# Altium integrated library LIB0.IntLib: 28 symbols
Pins are listed as number, name and electrical type; pins without a type are passive.

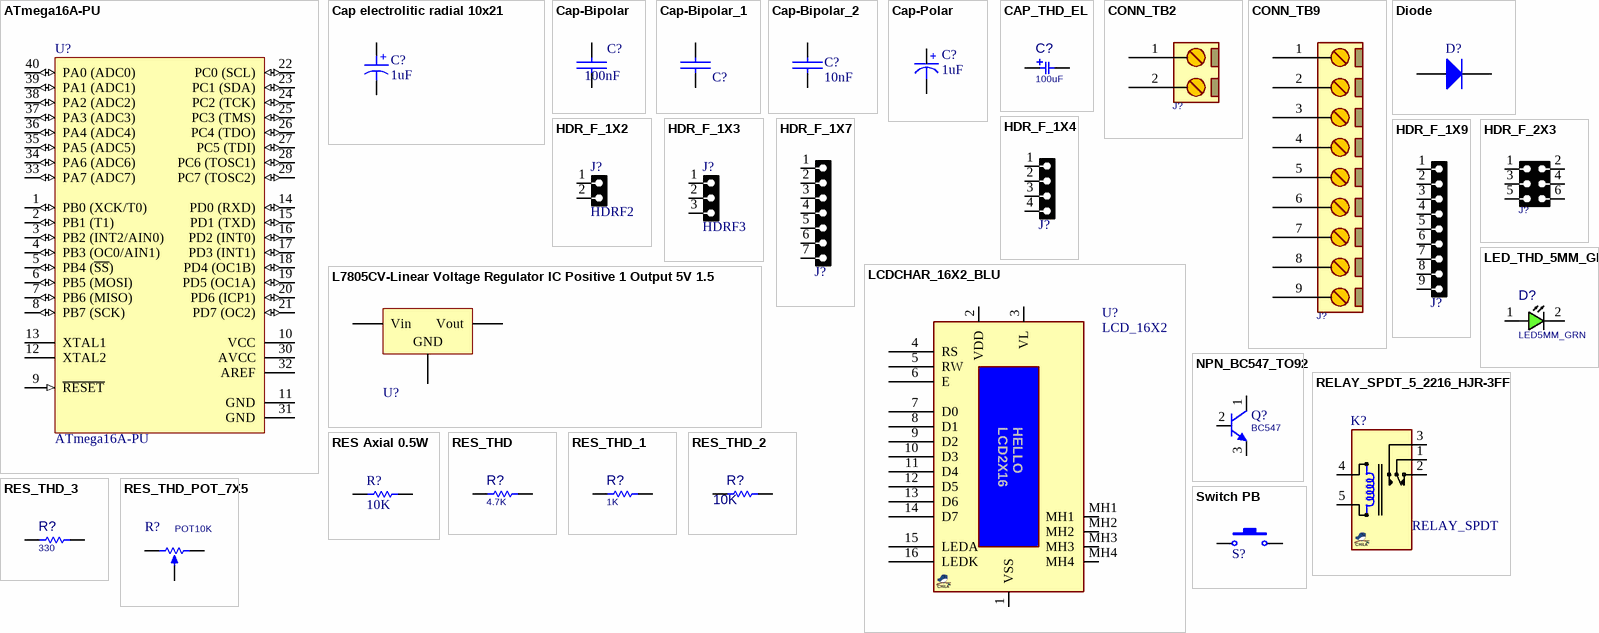
[diagram p0: symbols ATmega16A-PU to Switch PB]

## ATmega16A-PU
designator U?
footprint ATmega16A-PU 40P6
pins: 1 PB0 (XCK/T0) (io), 2 PB1 (T1) (io), 3 PB2 (INT2/AIN0) (io), 4 PB3 (OC0/AIN1) (io), 5 PB4 (~{SS}) (io), 6 PB5 (MOSI) (io), 7 PB6 (MISO) (io), 8 PB7 (SCK) (io), 9 ~{RESET} (in), 10 VCC (power), 11 GND (power), 12 XTAL2, 13 XTAL1, 14 PD0 (RXD) (io), 15 PD1 (TXD) (io), 16 PD2 (INT0) (io), 17 PD3 (INT1) (io), 18 PD4 (OC1B) (io), 19 PD5 (OC1A) (io), 20 PD6 (ICP1) (io), 21 PD7 (OC2) (io), 22 PC0 (SCL) (io), 23 PC1 (SDA) (io), 24 PC2 (TCK) (io), 25 PC3 (TMS) (io), 26 PC4 (TDO) (io), 27 PC5 (TDI) (io), 28 PC6 (TOSC1) (io), 29 PC7 (TOSC2) (io), 30 AVCC (power), 31 GND (power), 32 AREF (power), 33 PA7 (ADC7) (io), 34 PA6 (ADC6) (io), 35 PA5 (ADC5) (io), 36 PA4 (ADC4) (io), 37 PA3 (ADC3) (io), 38 PA2 (ADC2) (io), 39 PA1 (ADC1) (io), 40 PA0 (ADC0) (io)

## Cap electrolitic radial 10x21
designator C?, comment 1uF
Cap electrolitic radial; Part. No: 100U/50V; Designer: Abbas Basereh; Data: 16-12-2016
footprint Cap electrolitic radial 10x20-5 (Cap electrolitic radial 10x20-5-Design:Abbas Basereh)
pins: 1, 2
1 alternate drawing of the same symbol
text: +

## Cap-Bipolar
designator C?, comment 100nF
Bipolar Capacitor; Voltage: 100V; Designer: Saeid Jorablo; Organazation: ControTec; Adding Date: 1387/12/20; Value: 100nF
footprint Cap - 1uF - 400V - Right
footprint Cap - 1uF - 400V - Stand
footprint Cap - 10nF
footprint Cap - 100nF
footprint Cap - 100nF - MKŽ
footprint Cap - 680nF
footprint Cap - 10nF - 630V
footprint Cap - 100nF - 400V
footprint Cap - 220n - 400V - Poly
footprint Cap - 330nF - 400V
footprint Cap 402 (1005X05L) (Chip Capacitor, 2-Leads, Body 1.0x0.5mm, IPC High Density)
footprint Cap 603
footprint Cap 1206
footprint Cap 1206 (3216X15L) (Chip Capacitor, 2-Leads, Body 3.2x1.6mm, IPC High Density)
footprint Cap 1206 (3216X18L) Size A (Chip Capacitor, 2-Leads, Body 3.2x1.6mm, IPC High Density, chip Tantalum)
footprint Cap 805
pins: 1 +, 2 -

## Cap-Bipolar_1
designator C?, comment 100nF  (value not drawn)
Bipolar Capacitor; Voltage: 100V; Designer: Saeid Jorablo; Organazation: ControTec; Adding Date: 1387/12/20; Value: 100nF
footprint Cap - 1uF - 400V - Right
footprint Cap - 1uF - 400V - Stand
footprint Cap - 10nF
footprint Cap - 100nF
footprint Cap - 100nF - MKŽ
footprint Cap - 680nF
footprint Cap - 10nF - 630V
footprint Cap - 100nF - 400V
footprint Cap - 220n - 400V - Poly
footprint Cap - 330nF - 400V
footprint Cap 402 (1005X05L) (Chip Capacitor, 2-Leads, Body 1.0x0.5mm, IPC High Density)
footprint Cap 603
footprint Cap 1206
footprint Cap 1206 (3216X15L) (Chip Capacitor, 2-Leads, Body 3.2x1.6mm, IPC High Density)
footprint Cap 1206 (3216X18L) Size A (Chip Capacitor, 2-Leads, Body 3.2x1.6mm, IPC High Density, chip Tantalum)
footprint Cap 805
pins: 1 +, 2 -

## Cap-Bipolar_2
designator C?, comment 10nF
Bipolar Capacitor; Voltage: 100V; Designer: Saeid Jorablo; Organazation: ControTec; Value: 100nF; Adding Date: 1387/12/20
footprint Cap - 1uF - 400V - Right
footprint Cap - 1uF - 400V - Stand
footprint Cap - 10nF
footprint Cap - 100nF
footprint Cap - 100nF - MKŽ
footprint Cap - 680nF
footprint Cap - 10nF - 630V
footprint Cap - 100nF - 400V
footprint Cap - 220n - 400V - Poly
footprint Cap - 330nF - 400V
footprint Cap 402 (1005X05L) (Chip Capacitor, 2-Leads, Body 1.0x0.5mm, IPC High Density)
footprint Cap 603
footprint Cap 1206
footprint Cap 1206 (3216X15L) (Chip Capacitor, 2-Leads, Body 3.2x1.6mm, IPC High Density)
footprint Cap 1206 (3216X18L) Size A (Chip Capacitor, 2-Leads, Body 3.2x1.6mm, IPC High Density, chip Tantalum)
footprint Cap 805
pins: 1 +, 2 -

## Cap-Polar
designator C?, comment 1uF
Polar Capacitor; Designer: Saeid Jorablo; Organazation: ControTec; Voltage: 16V; Adding Date: 1387/12/20; Value: 1uF
footprint Cap - 1.5mm (cap1.5mm)
footprint Cap - 2mm
footprint Cap - 2.5mm (Capacitor Electrolytic D=6.3 x H=12 - P=2.5 mm, Altium Compatible)
footprint Cap - 3.5mm (Capacitor Electrolytic D=8 x H=12 - P=3.5 mm With Tampon, Altium Compatible)
footprint Cap - 4.5mm
footprint Cap - 3.5mm - 2
footprint Cap - 5mm (cap5mm)
footprint Cap - 7mm
footprint Cap - 8mm
footprint Cap SMD 1000UF 16V
footprint Cap SMD 100UF 35~50v
footprint Cap SMD 470uF (SMD CAP 470uF)
pins: 1 +, 2 -

## CAP_THD_EL
designator C?, comment 100uF
CAP, THD, ELEC,; MANF_P#: MANF_PART#; PARAM2: 25V; DESC: DESCRIPTION; DIST#: MOUSER; PARAM: 20%; PRICE: 10= 5$; MANF: MANF; ASSEMBLY: ASSEMBLY; VALUE: 100uF
footprint C_EL_4X7 (Cap Elec, D4.0X7.0H pitch: 1.5mm)
footprint C_EL_5X7 (Cap Elec, D5.0X7.0H pitch: 2mm)
footprint C_EL_5X11 (Cap Elec, D5.0X11.0H pitch: 2mm)
footprint C_EL_6X11 (Cap Elec, D6.3X11.0H pitch: 2.5mm)
footprint C_EL_8X12 (Cap Elec, D8.0X12.0H pitch: 3.5mm, RB.14/.26, RB.15/.32)
footprint C_EL_8X12R (Cap Elec, D8.0X12.0H pitch: 3.5mm, RIGHT ANGLE)
footprint C_EL_10X20 (Cap Elec, D10.0X20.0H pitch: 5.0mm, RB.2/.4)
footprint C_EL_12X25 (Cap Elec, D12.0X25.0H pitch: 5.0mm, RB.2/.5)
footprint C_EL_16X25 (Cap Elec, D16.0X25.0H pitch: 7.6mm, RB.3/.6)
footprint C_EL_18X35 (Cap Elec, D18.0X35.0H pitch: 7.6mm, RB.3/.7)
footprint C_EL_20X35 (Cap Elec, D20.0X35.0H pitch: 10.0mm, RB.4/.8)
footprint C_EL_25X40 (Cap Elec, D25.0X40.0H pitch: 12.8mm, RB.5/1)
footprint C_EL_30X50 (Cap Elec, D30.0X50.0H pitch: 10.0mm)
footprint C_EL_35X30 (Cap Elec, D35.0X30.0H pitch: 10.0mm, 470uF/400V, RB.44/1.3)
footprint C_EL_10X12 (Footprint not found)
footprint C_EL_6X12R (Capacitor Electrolythic, D6.3X12.0H pitch: 2.5mm)
footprint C_EL_5X12 (Capacitor Electrolythic, D5X12H pitch: 2mm)
footprint C_EL_5X20 (Capacitor Electrolythic, D5X20H pitch: 2.5mm)
footprint C_EL_6X12 (Capacitor Electrolythic, D6.3X12H pitch: 2.5mm)
footprint C_EL_6X7 (Capacitor Electrolythic, D6.3X7.0H pitch: 2.5mm)
footprint C_EL_8X14 (Capacitor Electrolythic, D8X14H pitch: 3.5mm)
footprint C_EL_8X20 (Capacitor Electrolythic, D8X14H pitch: 3.5mm)
footprint C_EL_10X16 (Capacitor Electrolythic, D10.0X16.0H pitch: 5.0mm)
footprint C_EL_10X16R (Capacitor Electrolythic, D10.0X16.0H pitch: 5.0mm)
footprint C_EL_10X20R (Capacitor Electrolythic, D10X20H pitch: 5.0mm)
footprint C_EL_10X25R (Capacitor Electrolythic, D10X25H pitch: 5mm)
footprint C_EL_10X30 (Capacitor Electrolythic, D10X30H pitch: 5mm)
footprint C_EL_10X30R (Capacitor Electrolythic, D10X30H pitch: 5mm)
footprint C_EL_10X40R (Capacitor Electrolythic, D10X40H pitch: 5mm)
footprint C_EL_10X45R (Capacitor Electrolythic, D10X45H pitch: 5mm)
footprint C_EL_10X50R (Capacitor Electrolythic, D10X50H pitch: 5mm)
footprint C_EL_12X15 (Capacitor Electrolythic, D12.5X15H pitch: 5mm)
footprint C_EL_12X20 (Capacitor Electrolythic, D12.5X20H pitch: 5mm)
footprint C_EL_12X20R (Capacitor Electrolythic, D12.5X20H pitch: 5mm)
footprint C_EL_12X25R (Capacitor Electrolythic, D12.5X25H pitch: 5mm)
footprint C_EL_12X30 (Capacitor Electrolythic, D12.5X30H pitch: 5mm)
footprint C_EL_12X30R (Capacitor Electrolythic, D12.5X30H pitch: 5mm)
footprint C_EL_12X35 (Capacitor Electrolythic, D12.5X35H pitch: 5mm)
footprint C_EL_12X35R (Capacitor Electrolythic, D12.5X35H pitch: 5mm)
footprint C_EL_12X40 (Capacitor Electrolythic, D12.5X40H pitch: 5mm)
footprint C_EL_12X40R (Capacitor Electrolythic, D12.5X40H pitch: 5mm)
footprint C_EL_12X45 (Capacitor Electrolythic, D12.5X45H pitch: 5mm)
footprint C_EL_12X45R (Capacitor Electrolythic, D12.5X45H pitch: 5mm)
footprint C_EL_12X50 (Capacitor Electrolythic, D12.5X50H pitch: 5mm)
footprint C_EL_12X50R (Capacitor Electrolythic, D12.5X50H pitch: 5mm)
footprint C_EL_13X25 (Capacitor Electrolythic, D13X25H pitch: 5mm)
footprint C_EL_14X20 (Capacitor Electrolythic, D14.5X20H pitch: 7.4mm)
footprint C_EL_14X20R (Capacitor Electrolythic, D14.5X20H pitch: 7.4mm)
footprint C_EL_14X25 (Capacitor Electrolythic, D14.5X25H pitch: 7.4mm)
footprint C_EL_14X25R (Capacitor Electrolythic, D14.5X25H pitch: 7.4mm)
footprint C_EL_14X30 (Capacitor Electrolythic, D14.5X30H pitch: 7.4mm)
footprint C_EL_14X30R (Capacitor Electrolythic, D14.5X30H pitch: 7.4mm)
footprint C_EL_14X35 (Capacitor Electrolythic, D14.5X35H pitch: 7.4mm)
footprint C_EL_14X35R (Capacitor Electrolythic, D14.5X35H pitch: 7.4mm)
footprint C_EL_14X40 (Capacitor Electrolythic, D14.5X40H pitch: 7.4mm)
footprint C_EL_14X40R (Capacitor Electrolythic, D14.5X40H pitch: 7.4mm)
footprint C_EL_14X45 (Capacitor Electrolythic, D14.5X45H pitch: 7.4mm)
footprint C_EL_14X45R (Capacitor Electrolythic, D14.5X45H pitch: 7.4mm)
footprint C_EL_14X50 (Capacitor Electrolythic, D14.5X50H pitch: 7.4mm)
footprint C_EL_14X50R (Capacitor Electrolythic, D14.5X50H pitch: 7.4mm)
footprint C_EL_16X15 (Capacitor Electrolythic, D16X15H pitch: 7.4mm)
footprint C_EL_16X20 (Capacitor Electrolythic, D16X20H pitch: 7.4mm)
footprint C_EL_16X20R (Capacitor Electrolythic, D16X20H pitch: 7.4mm)
footprint C_EL_16x25R (Capacitor Electrolythic, D16X25H pitch: 7.4mm)
footprint C_EL_16X31 (Capacitor Electrolythic, D16X31H pitch: 7.4mm)
footprint C_EL_16X31R (Capacitor Electrolythic, D16X31H pitch: 7.4mm)
footprint C_EL_16X35R (Capacitor Electrolythic, D16X35H pitch: 7.4mm)
footprint C_EL_16X35 (Capacitor Electrolythic, D16X35H pitch: 7.4mm)
footprint C_EL_16X40 (Capacitor Electrolythic, D16X40H pitch: 7.4mm)
footprint C_EL_16X40R (Capacitor Electrolythic, D16X40H pitch: 7.4mm)
footprint C_EL_16X45 (Capacitor Electrolythic, D16X45H pitch: 7.4mm)
footprint C_EL_16X45R (Capacitor Electrolythic, D16X45H pitch: 7.4mm)
footprint C_EL_16X50 (Capacitor Electrolythic, D16X50H pitch: 7.4mm)
footprint C_EL_16X50R (Capacitor Electrolythic, D16X50H pitch: 7.4mm)
footprint C_EL_18X20 (Capacitor Electrolythic, D18X20H pitch: 7.4mm)
footprint C_EL_18X20R (Capacitor Electrolythic, D18X20H pitch: 7.4mm)
footprint C_EL_18X25 (Capacitor Electrolythic, D18X25H pitch: 7.4mm)
footprint C_EL_18X25R (Capacitor Electrolythic, D18X25H pitch: 7.4mm)
footprint C_EL_18X31 (Capacitor Electrolythic, D18X31H pitch: 7.4mm)
footprint C_EL_18X31R (Capacitor Electrolythic, D18X31H pitch: 7.4mm)
footprint C_EL_18X35R (Capacitor Electrolythic, D18X35H pitch: 7.4mm)
footprint C_EL_18X40 (Capacitor Electrolythic, D18X40H pitch: 7.4mm)
footprint C_EL_18X45 (Capacitor Electrolythic, D18X45H pitch: 7.4mm)
footprint C_EL_18X40R (Capacitor Electrolythic, D18X40H pitch: 7.4mm)
footprint C_EL_18X45R (Capacitor Electrolythic, D18X45H pitch: 7.4mm)
footprint C_EL_18X50 (Capacitor Electrolythic, D18X50H pitch: 7.4mm)
footprint C_EL_18X50R (Capacitor Electrolythic, D18X50H pitch: 7.4mm)
footprint C_EL_26X13X27 (Cap Elec, 26X13X27mm, 18mm pitch)
pins: 1, 2

## CONN_TB2
designator J?  (value not drawn)
CONN, TERMINAL BLOCK, 5.08mm pitch; VALUE: CONN_TB2
footprint TBG_2 (Terminal Block Green)
footprint TBB_2 (Terminal Block Blue)
pins: 1, 2

## CONN_TB9
designator J?  (value not drawn)
CONN, TERMINAL BLOCK, 5.08mm pitch; VALUE: CONN_TB9
footprint TBG_9 (Terminal Block Green)
footprint TBB_9 (Terminal Block Blue)
pins: 1, 2, 3, 4, 5, 6, 7, 8, 9

## Diode
designator D?  (value not drawn)
Published: 8-Jun-2000; LatestRevisionDate: 17-Jul-2002; LatestRevisionNote: Re-released for DXP Platform.; DatasheetVersion: 1997; Publisher: Altium Limited; PackageDescription: Diode, Axial; Body 3.8 x 1.9 mm (LxDia. max), Lead Dia. 0.53 mm (max); Code_JEDEC: DO-204-AH; ComponentLink1Description: Manufacturer Link; ComponentLink1URL: http://www.fairchildsemi.com/; ComponentLink2Description: Datasheet; ComponentLink2URL: http://www.fairchildsemi.com/ds/1N%2F1N4148.pdf
signal-integrity model 1N4148
footprint Diode 1206
footprint Diode 1n4148 Stand
footprint Diode 1n4148
footprint Diode 1N5819 (Schottkey 1.0A 40V)
footprint Diode 1N4007 SMD (DO-214AC 1N4001-4007)
footprint Diode 1N4007 Stand
footprint Diode 1n4148 SMD (Mini MELF SOD-80)
footprint Diode 1n4007
footprint SMD 402
footprint SMD 805
footprint SMD 1206
footprint SMD 603 (Chip Inductor, Body 0.6x0.3mm, IPC High Density)
pins: 1 A, 2 K

## HDR_F_1X2
designator J?, comment HDRF2
CONN, HEADER, Female, pitch: 2.54mm, 2POS; VALUE: HDRF2
footprint HDR_F_1X2 (HEADER FEMALE pitch: 2.54mm)
pins: 1, 2

## HDR_F_1X3
designator J?, comment HDRF3
CONN, HEADER, Female, pitch: 2.54mm, 3POS; VALUE: HDRF3
footprint HDR_F_1X3 (HEADER FEMALE pitch: 2.54mm)
pins: 1, 2, 3

## HDR_F_1X4
designator J?, comment HDRF4  (value not drawn)
CONN, HEADER, Female, pitch: 2.54mm, 4POS; VALUE: HDRF4
footprint HDR_F_1X4 (HEADER FEMALE pitch: 2.54mm)
pins: 1, 2, 3, 4

## HDR_F_1X7
designator J?, comment HDRF7  (value not drawn)
CONN, HEADER, Female, pitch: 2.54mm, 7POS; VALUE: HDRF7
footprint HDR_F_1X7 (HEADER FEMALE pitch: 2.54mm)
pins: 1, 2, 3, 4, 5, 6, 7

## HDR_F_1X9
designator J?, comment HDRF9  (value not drawn)
CONN, HEADER, Female, pitch: 2.54mm, 9POS; VALUE: HDRF9
footprint HDR_F_1X9 (HEADER FEMALE pitch: 2.54mm)
pins: 1, 2, 3, 4, 5, 6, 7, 8, 9

## HDR_F_2X3
designator J?, comment HDRF_2X3  (value not drawn)
CONN, HEADER, Female, pitch: 2.54mm, 6POS; MANF_P#: MANF_PART#; MANF: MANF; VALUE: HDRF_2X3
footprint HDR_F_2X3 (Connector; Header; 3x2 Position)
pins: 1, 2, 3, 4, 5, 6

## L7805CV-Linear Voltage Regulator IC Positive 1 Output 5V 1.5A TO-220AB
designator U?, comment L7805CV  (value not drawn)
Linear Voltage Regulator IC Positive FIXED; Manufacturer: STMicroelectronics; Designer: Abbas Basereh; Link: https://www.aliexpress.com/item/; Link: http://www.tme.eu/en/; Link: http://www.digikey.com/; Part. No: L7805CV
footprint TO-220 AB WITH HEAT SINK (Epoxy meets UL94, V0)
footprint TO-220 AB (Epoxy meets UL94, V0)
footprint TO-220 AB S (Epoxy meets UL94, V0)
footprint TO-220 AB WITH HEAT SINK ASM
footprint TO-220 AB with heatsink ya25 (Epoxy meets UL94, V0-Design:Abbas Basereh)
pins: 1 Vin, 2 GND, 3 Vout

## LCDCHAR_16X2_BLU
designator U?, comment LCD_16X2
LCD Character Disp, 16X2; MANF: Newhaven; MANF_P#: NHD-0216K3Z-NSW-BBW-V3; PARAM2: Blue back, White, 5V; PARAM: 2 lines x 16 characters; VALUE: LCD_16X2
footprint LCDCHAR_16X2_BLU (LCD Characters Display, 2linesX16char, Blue, header1x16)
pins: 1 VSS, 2 VDD, 3 VL, 4 RS, 5 RW, 6 E, 7 D0, 8 D1, 9 D2, 10 D3, 11 D4, 12 D5, 13 D6, 14 D7, 15 LEDA, 16 LEDK, MH1, MH2, MH3, MH4
text: LCD2X16; HELLO

## LED_THD_5MM_GRN
designator D?, comment LED5MM_GRN
LED, THD, 5MM, GREEN; DESC: DESCRIPTION; MANF_P#: MANF_PART#; PARAM2: 2.2V; MANF: MANF; ASSEMBLY: ASSEMBLY; PRICE: PRICE; VALUE: LED5MM_GRN
footprint LED5MM_GRN (LED 5MM THROUGH HOLE GREEN)
pins: 1 ANODE, 2 CATHODE

## NPN_BC547_TO92
designator Q?, comment BC547
BJT, NPN, 45v, 0.1A, THD, TO92; PARAM: 0.1A, Hfe110~800; PARAM2: 45v, 500mW; MANF: FAIRCHILD; MANF_P#: BC547; VALUE: BC547
footprint TO92_3 (TO-92)
simulation model NS3904
pins: 1 C, 2 B, 3 E

## RELAY_SPDT_5_2216_HJR-3FF
designator K?, comment RELAY_SPDT
Relay, SPDT, 5P, 19X15mm, 240VAC/7A; MANF: TIANBO; MANF_P#: HJR-3FF--12VDC; PARAM2: 7A, 240VAC /10A 120VAC/24VDC; PARAM: 12V, 30mA, 400Ohm; PRICE: PRICE; Value: RELAY_SPDT
footprint REL_SPDT_5_2216 (RELAY SPDT, OMRON G5LE SERIES, 22X16mm and 18.8x15.4mm, HJR-3FF, RAS-1215)
simulation model SPDTRELAY (Spice Subcircuit)
pins: 1 COM, 2 NC, 3 NO, 4 T1, 5 T2

## RES Axial 0.5W
designator R?, comment 10K
RES Axial 0.5W; Designer: Abbas Basereh; Desc.: RES Axial 0.5W; Data: 4-1-2017
footprint Axial 0_5W 5_0mm (Designer Abbas Basereh)
pins: 1, 2

## RES_THD
designator R?, comment 4.7K
RESISTOR, THD; MANF_P#: RK73H1ETTP4701F; MANF: KOA SPEER; PARAM: 0.063W; DESC: DESCRIPTION; DIST#: MOUSER; PARAM2: 1%; VALUE: 10K; ASSEMBLY: ASSEMBLY; PRICE: 100= 0.5$
footprint R0125W_AX025 (RESISTOR 1/8 WATT, AXIAL0.25)
footprint R1W_AX06 (RESISTOR 1 WATT, AXIAL0.6)
footprint R2W_AX08 (RESISTOR 2 WATT, AXIAL0.8)
footprint R2W_AX_VER (RESISTOR 2 WATT, AXIAL0.8)
footprint R3W_AX09 (RESISTOR 3 WATT, AXIAL0.9)
footprint RWW4W (RESISTOR 4 WATT, Ceramic Wirewound)
footprint R05W_AX05 (RESISTOR 0.5 WATT, AXIAL0.5)
footprint R025W_AX04 (RESISTOR 1/4 WATT, AXIAL0.4)
footprint R025W_AX_VER (RESISTOR 1/4 WATT, AXIAL0.4)
footprint R0125W_AX03 (RESISTOR 1/8 WATT, AXIAL0.3 INCH SPACING)
footprint R0125W_AX_VER (RESISTOR 1/8 WATT, AXIAL0.25)
footprint RWW2W_VER (RESISTOR 2 WATT, Wirewound)
footprint RWW10W_VER (RESISTOR 10 WATT, Wirewound)
footprint R10W_AX11 (RESISTOR 10 WATT, AXIAL1.1)
footprint R10W_AX14 (RESISTOR 10 WATT, AXIAL1.4)
footprint R10W_AX20 (RESISTOR 10 WATT, AXIAL2.0)
footprint RWW5W (Footprint not found)
footprint RWW5W_VER (Footprint not found)
pins: 1, 2

## RES_THD_1
designator R?, comment 1K
RESISTOR, THD; MANF_P#: RK73H1ETTP4701F; MANF: KOA SPEER; PARAM: 0.063W; DESC: DESCRIPTION; DIST#: MOUSER; PARAM2: 1%; VALUE: 10K; ASSEMBLY: ASSEMBLY; PRICE: 100= 0.5$
footprint R0125W_AX025 (RESISTOR 1/8 WATT, AXIAL0.25)
footprint R1W_AX06 (RESISTOR 1 WATT, AXIAL0.6)
footprint R2W_AX08 (RESISTOR 2 WATT, AXIAL0.8)
footprint R2W_AX_VER (RESISTOR 2 WATT, AXIAL0.8)
footprint R3W_AX09 (RESISTOR 3 WATT, AXIAL0.9)
footprint RWW4W (RESISTOR 4 WATT, Ceramic Wirewound)
footprint R05W_AX05 (RESISTOR 0.5 WATT, AXIAL0.5)
footprint R025W_AX04 (RESISTOR 1/4 WATT, AXIAL0.4)
footprint R025W_AX_VER (RESISTOR 1/4 WATT, AXIAL0.4)
footprint R0125W_AX03 (RESISTOR 1/8 WATT, AXIAL0.3 INCH SPACING)
footprint R0125W_AX_VER (RESISTOR 1/8 WATT, AXIAL0.25)
footprint RWW2W_VER (RESISTOR 2 WATT, Wirewound)
footprint RWW10W_VER (RESISTOR 10 WATT, Wirewound)
footprint R10W_AX11 (RESISTOR 10 WATT, AXIAL1.1)
footprint R10W_AX14 (RESISTOR 10 WATT, AXIAL1.4)
footprint R10W_AX20 (RESISTOR 10 WATT, AXIAL2.0)
footprint RWW5W (Footprint not found)
footprint RWW5W_VER (Footprint not found)
pins: 1, 2

## RES_THD_2
designator R?, comment 10K
RESISTOR, THD; MANF_P#: RK73H1ETTP4701F; MANF: KOA SPEER; PARAM: 0.063W; DESC: DESCRIPTION; DIST#: MOUSER; PARAM2: 1%; ASSEMBLY: ASSEMBLY; PRICE: 100= 0.5$; VALUE: 10K
footprint R0125W_AX025 (RESISTOR 1/8 WATT, AXIAL0.25)
footprint R1W_AX06 (RESISTOR 1 WATT, AXIAL0.6)
footprint R2W_AX08 (RESISTOR 2 WATT, AXIAL0.8)
footprint R2W_AX_VER (RESISTOR 2 WATT, AXIAL0.8)
footprint R3W_AX09 (RESISTOR 3 WATT, AXIAL0.9)
footprint RWW4W (RESISTOR 4 WATT, Ceramic Wirewound)
footprint R05W_AX05 (RESISTOR 0.5 WATT, AXIAL0.5)
footprint R025W_AX04 (RESISTOR 1/4 WATT, AXIAL0.4)
footprint R025W_AX_VER (RESISTOR 1/4 WATT, AXIAL0.4)
footprint R0125W_AX03 (RESISTOR 1/8 WATT, AXIAL0.3 INCH SPACING)
footprint R0125W_AX_VER (RESISTOR 1/8 WATT, AXIAL0.25)
footprint RWW2W_VER (RESISTOR 2 WATT, Wirewound)
footprint RWW10W_VER (RESISTOR 10 WATT, Wirewound)
footprint R10W_AX11 (RESISTOR 10 WATT, AXIAL1.1)
footprint R10W_AX14 (RESISTOR 10 WATT, AXIAL1.4)
footprint R10W_AX20 (RESISTOR 10 WATT, AXIAL2.0)
footprint RWW5W (Footprint not found)
footprint RWW5W_VER (Footprint not found)
pins: 1, 2

## RES_THD_3
designator R?, comment 330
RESISTOR, THD; MANF_P#: RK73H1ETTP4701F; MANF: KOA SPEER; PARAM: 0.063W; DESC: DESCRIPTION; DIST#: MOUSER; PARAM2: 1%; VALUE: 10K; ASSEMBLY: ASSEMBLY; PRICE: 100= 0.5$
footprint R0125W_AX025 (RESISTOR 1/8 WATT, AXIAL0.25)
footprint R1W_AX06 (RESISTOR 1 WATT, AXIAL0.6)
footprint R2W_AX08 (RESISTOR 2 WATT, AXIAL0.8)
footprint R2W_AX_VER (RESISTOR 2 WATT, AXIAL0.8)
footprint R3W_AX09 (RESISTOR 3 WATT, AXIAL0.9)
footprint RWW4W (RESISTOR 4 WATT, Ceramic Wirewound)
footprint R05W_AX05 (RESISTOR 0.5 WATT, AXIAL0.5)
footprint R025W_AX04 (RESISTOR 1/4 WATT, AXIAL0.4)
footprint R025W_AX_VER (RESISTOR 1/4 WATT, AXIAL0.4)
footprint R0125W_AX03 (RESISTOR 1/8 WATT, AXIAL0.3 INCH SPACING)
footprint R0125W_AX_VER (RESISTOR 1/8 WATT, AXIAL0.25)
footprint RWW2W_VER (RESISTOR 2 WATT, Wirewound)
footprint RWW10W_VER (RESISTOR 10 WATT, Wirewound)
footprint R10W_AX11 (RESISTOR 10 WATT, AXIAL1.1)
footprint R10W_AX14 (RESISTOR 10 WATT, AXIAL1.4)
footprint R10W_AX20 (RESISTOR 10 WATT, AXIAL2.0)
footprint RWW5W (Footprint not found)
footprint RWW5W_VER (Footprint not found)
pins: 1, 2

## RES_THD_POT_7X5
designator R?, comment POT10K
RESISTOR, THD, Potentiometer; VALUE: POT10K
footprint POT_7X5 (POT, TRIM, 7.5X5.0mm, pitch: 5.0mm)
pins: 1 TOP, 2 TAP, 3 BOT

## Switch PB
designator S?  (value not drawn)
Push Button Switch
footprint Switch - Push to On
footprint SW-PB
pins: 1, 2